# Altium footprint library Brian_.PcbLib: 66 footprints (part 2 of 5)
Each footprint in its own frame and in the unit in brackets; x right, y up, seen from the top. Pads: shape width x height; smd on the part's side, far side on the other; paste and mask are expansions set on the pad; w line width, h text height; cw(c..) or ccw(c..) is an arc to the next point about the centre after c.
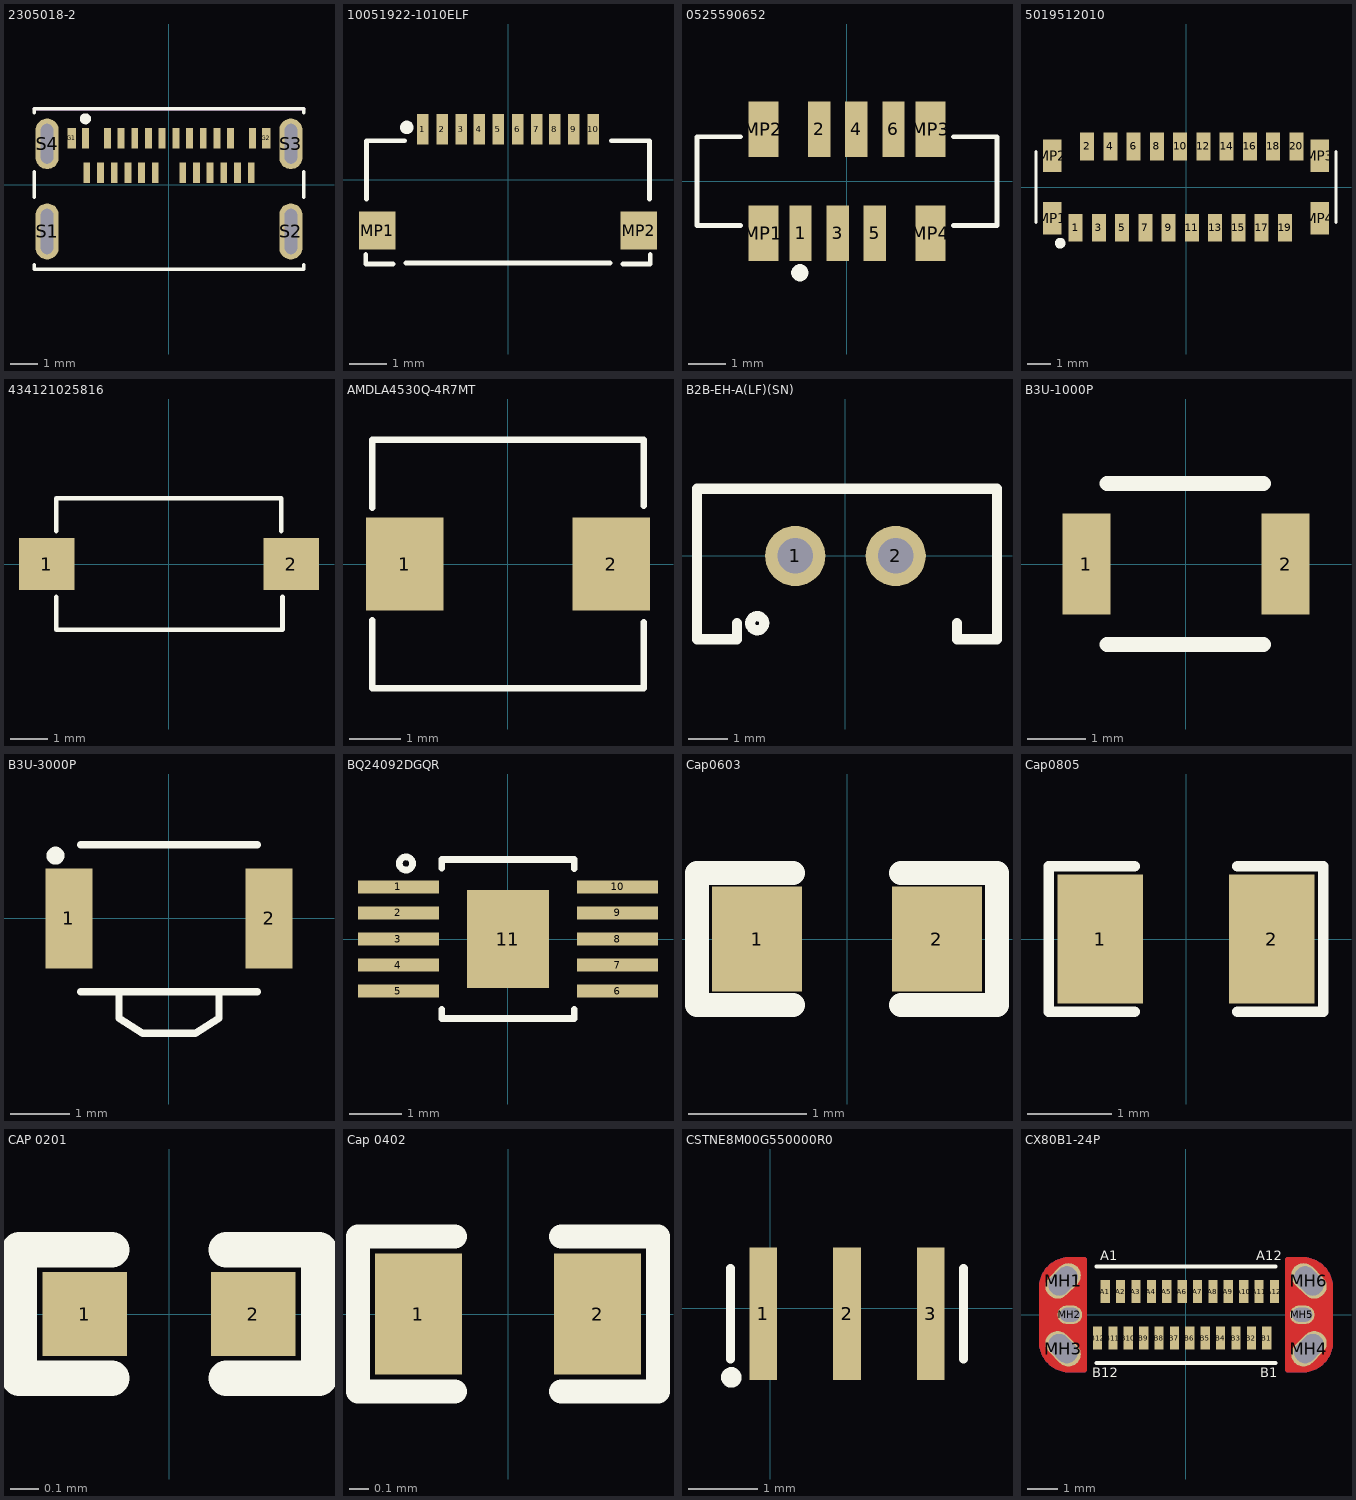
[diagram p1: the footprints below, top view; thin cyan lines are the x and y axes]

## 2305018-2 [mm]
pads (30):
  rect 0.25x0.75 smd: A1(-3.05,1.7) A2(-2.25,1.7) A3(-1.75,1.7) A4(-1.25,1.7) A5(-0.75,1.7) A6(-0.25,1.7) A7(0.25,1.7) A8(0.75,1.7) A9(1.25,1.7) A10(1.75,1.7) A11(2.25,1.7) A12(3.05,1.7) B1(3,0.45) B2(2.5,0.45) B3(2,0.45) B4(1.5,0.45) B5(1,0.45) B6(0.5,0.45) B7(-0.5,0.45) B8(-1,0.45) B9(-1.5,0.45) B10(-2,0.45) B11(-2.5,0.45) B12(-3,0.45)
  rect 0.3x0.75 smd: G1(-3.55,1.7) G2(3.55,1.7)
  oval 0.85x2.05 hole 0.45 slot 1.65 at 90 deg: S1(-4.45,-1.7) S2(4.45,-1.7)
  oval 0.85x1.85 hole 0.45 slot 1.45 at 90 deg: S3(4.45,1.5) S4(-4.45,1.5)
Top Overlay:
  circle w0.2: c-3.05,2.413 r0.1
  lines w0.127: -4.925,-2.906 -4.925,-3.075 4.925,-3.075 4.925,-2.906 ; -4.925,-0.444 -4.925,0.48 ; -4.925,2.634 -4.925,2.775 4.925,2.775 4.925,2.634 ; 4.925,-0.444 4.925,0.48
Mechanical 13:
  lines w0.127: -4.925,2.775 4.925,2.775
3D body "2305018-2--3DModel-STEP-56544.STEP": height 3.53, standoff -0.53, extent -4.919,-5.856 4.919,2.794

## 10051922-1010ELF [mil]
pads (12):
  rect 12x32 smd: 1(-89,53) 2(-69,53) 3(-49,53) 4(-30,53) 5(-10,53) 6(10,53) 7(30,53) 8(49,53) 9(69,53) 10(89,53)
  rect 38x40 smd: MP1(-137,-53) MP2(137,-53)
Top Overlay:
  circle w10: c-106,55 r2
  lines w5: -149,-78 -149,-88 -120,-88 ; -148,-20 -148,41 -108,41 ; -107,-87 107,-87 ; 108,41 148,41 148,-20 ; 120,-88 149,-88 149,-78
3D body "s10051922_1010elf.stp": height 50, standoff -1.18, extent -147.64,-86 147.64,61.64

## 0525590652 [mm]
pads (10):
  rect 0.6x1.5 smd: 1(-1.25,-1.4) 2(-0.75,1.4) 3(-0.25,-1.4) 4(0.25,1.4) 5(0.75,-1.4) 6(1.25,1.4)
  rect 0.8x1.5 smd: MP1(-2.25,-1.4) MP2(-2.25,1.4) MP3(2.25,1.4) MP4(2.25,-1.4)
Top Overlay:
  circle w0.254: c-1.27,-2.464 r0.105
  lines w0.127: -2.87,-1.194 -4.039,-1.194 -4.039,1.194 -2.87,1.194 ; 2.87,-1.194 4.039,-1.194 4.039,1.194 2.87,1.194
3D body "525590652.stp": height 3.9, standoff 0, extent -4.35,-1.65 4.35,1.85

## 5019512010 [mm]
pads (24):
  rect 0.6x1.2 smd: 1(-4.75,-1.75) 2(-4.25,1.75) 3(-3.75,-1.75) 4(-3.25,1.75) 5(-2.75,-1.75) 6(-2.25,1.75) 7(-1.75,-1.75) 8(-1.25,1.75) 9(-0.75,-1.75) 10(-0.25,1.75) 11(0.25,-1.75) 12(0.75,1.75) 13(1.25,-1.75) 14(1.75,1.75) 15(2.25,-1.75) 16(2.75,1.75) 17(3.25,-1.75) 18(3.75,1.75) 19(4.25,-1.75) 20(4.75,1.75)
  rect 0.8x1.4 smd: MP1(-5.75,-1.35) MP2(-5.75,1.35) MP3(5.75,1.35) MP4(5.75,-1.35)
Top Overlay:
  circle w0.254: c-5.41,-2.413 r0.102
  lines w0.127: -6.452,-1.524 -6.452,1.524 ; 6.452,-1.524 6.452,1.524
3D body "5019512010.stp": height 4.56, standoff -0.04, extent -6.4,-2.132 6.4,2.002

## 434121025816 [mm] "SWITCH TACTILE SPST-NO 0.05A 12V"
pads (2):
  rect 1.5x1.4 smd: 1(-3.3,0) 2(3.3,0)
Top Overlay:
  lines w0.127: -3.048,-0.889 -3.048,-1.778 3.066,-1.778 3.066,-0.889 ; -3.048,0.889 -3.048,1.778 3.033,1.778 3.033,0.889
3D body "434121025816_Download_STP_434121025816_rev1.stp": height 2.5, standoff 0, extent -3.65,-1.95 3.65,1.95

## AMDLA4530Q-4R7MT [mm]
pads (2):
  rect 1.5x1.8 smd: 1(-2,0) 2(2,0)
Top Overlay:
  lines w0.127: -2.628,-1.092 -2.628,-1.512 -2.628,-2.401 0,-2.401 2.628,-2.401 ; -2.628,1.092 -2.628,1.512 -2.628,2.401 0,2.401 2.628,2.401 ; 2.628,-2.35 2.628,-1.512 2.628,-1.131 ; 2.628,1.131 2.628,1.512 2.628,2.35
3D body "amdla4530q-4r7mt.stp": height 2.92, standoff 0.02, extent -2.55,-2.35 2.55,2.35

## B2B-EH-A(LF)(SN) [mil]
pads (2):
  round 60 hole 35.43: 1(-50,0) 2(50,0)
Top Overlay:
  circle w10: c-88,-67 r7.07
  lines w10: -108,-67 -108,-83 -148,-83 -148,67 151,67 151,-83 111,-83 111,-67
3D body "User Library-B2B-EH-A.step": height 244.09, standoff -118.11, extent -147.64,-85.61 147.64,64

## B3U-1000P [mm] "SWITCH TACTILE SPST-NO 0.05A 12V"
pads (2):
  rect 0.82x1.72 smd: 1(-1.7,0) 2(1.7,0)
Top Overlay:
  lines w0.254: -1.346,-1.372 0,-1.372 1.321,-1.372 ; -1.346,1.372 0,1.372 1.321,1.372
3D body "User Library-OMRON B3U1000P.step": height 1.6, standoff 0, extent -2,-1.263 2,1.237

## B3U-3000P [mm]
pads (2):
  rect 0.8x1.7 smd mask+0.06: 1(-1.7,0) 2(1.7,0)
Top Overlay:
  circle w0.254: c-1.93,1.067 r0.025
  lines w0.127: -1.5,-1.25 -0.85,-1.25 ; -1.5,1.25 1.5,1.25 ; 1.5,-1.25 0.85,-1.25 ; -0.85,-1.25 0.85,-1.25 ; -0.85,-1.25 -0.85,-1.7 -0.45,-1.95 0.45,-1.95 0.85,-1.7 0.85,-1.25
3D body "B3U-3000P--3DModel-STEP-56544.STEP": height 1.2, standoff 0, extent -2,-1.95 2,1.25

## BQ24092DGQR [mm] "IC BATT CHG LI-ION 1CELL 10MSOP"
pads (11):
  rect 1.55x0.25 smd: 1(-2.1,1) 2(-2.1,0.5) 3(-2.1,0) 4(-2.1,-0.5) 5(-2.1,-1) 6(2.1,-1) 7(2.1,-0.5) 8(2.1,0) 9(2.1,0.5) 10(2.1,1)
  rect 1.57x1.88 smd: 11(0,0)
Top Overlay:
  circle w0.127: c-1.956,1.448 r0.127
  lines w0.127: -1.27,-1.348 -1.27,-1.524 1.27,-1.524 1.27,-1.349 ; -1.27,1.355 -1.27,1.524 1.27,1.524 1.27,1.35
3D body "BQ24092DGQR.STEP": height 1.1, standoff 0, extent -2.45,-1.5 2.45,1.5

## Cap0603 [mil]
pads (2):
  rect 30x35 smd mask+2.36: 1(-30,0) 2(30,0)
Top Overlay:
  lines w7.87: -18,-22 -50,-22 -50,22 -18,22 ; 18,-22 50,-22 50,22 18,22
3D body "User Library-CAPC1608X09.step": height 34.25, standoff -1.18, extent -31.51,-15.75 31.49,15.74

## Cap0805 [mil] "SMD 0805"
pads (2):
  rect 40x60 smd mask+2.76: 1(-40,0) 2(40,0)
Top Overlay:
  lines w5: -24,-34 -64,-34 -64,34 -24,34 ; 24,-34 64,-34 64,34 24,34
3D body "User Library-0805 SMD Capacitor.step": height 30, standoff -0.79, extent -39.36,-24.6 39.38,24.61

## CAP 0201 [mm]
pads (2):
  rect 0.3x0.3 smd mask+0.055: 1(-0.3,0) 2(0.3,0)
Top Overlay:
  lines w0.127: -0.203,-0.229 -0.533,-0.229 -0.533,0.229 -0.203,0.229 ; 0.203,-0.229 0.533,-0.229 0.533,0.229 0.203,0.229
3D body "User Library-SMD Ceramic Capacitors_0201 (0603)_AB.STEP": height 0.28, standoff -0.02, extent -0.3,-0.15 0.301,0.15

## Cap 0402 [mil]
pads (2):
  rect 18x25 smd mask+2.36: 1(-18.5,0) 2(18.5,0)
Top Overlay:
  lines w5: -11,-16 -31,-16 -31,16 -11,16 ; 11,-16 31,-16 31,16 11,16
3D body "User Library-Capacitor 0402.step": height 18.5, standoff -1.18, extent -19.68,-9.84 19.7,9.85

## CSTNE8M00G550000R0 [mm]
pads (3):
  rect 0.4x1.9 smd: 1(-0.102,-0.076) 2(1.098,-0.076) 3(2.298,-0.076)
Top Overlay:
  circle w0.2: c-0.559,-0.991 r0.047
  lines w0.127: -0.571,-0.726 -0.571,0.574 ; 2.768,-0.726 2.768,0.574
3D body "step_temp.STEP": height 0.8, standoff 0, extent -0.501,-0.726 2.698,0.574

## CX80B1-24P [mm]
pads (30):
  rect 0.3x0.75 smd: A1(-2.625,0.755) A2(-2.125,0.755) A3(-1.625,0.755) A4(-1.125,0.755) A5(-0.625,0.755) A6(-0.125,0.755) A7(0.375,0.755) A8(0.875,0.755) A9(1.375,0.755) A10(1.875,0.755) A11(2.375,0.755) A12(2.875,0.755) B1(2.625,-0.755) B2(2.125,-0.755) B3(1.625,-0.755) B4(1.125,-0.755) B5(0.625,-0.755) B6(0.125,-0.755) B7(-0.375,-0.755) B8(-0.875,-0.755) B9(-1.375,-0.755) B10(-1.875,-0.755) B11(-2.375,-0.755) B12(-2.875,-0.755)
  oval 1.3x0.8 hole 0.7 slot 1.05 at 45 deg rot 45: MH1(-3.995,1.1) MH4(3.995,-1.1)
  oval 0.8x0.6 hole 0.45 slot 0.65 at 0 deg: MH2(-3.775,0) MH5(3.775,0)
  oval 1.3x0.8 hole 0.7 slot 1.05 at 135 deg rot 135: MH3(-3.995,-1.1) MH6(3.995,1.1)
Top Layer:
  region: 3.827,1.874 3.88,1.87 3.931,1.863 3.983,1.853 4.034,1.841 4.084,1.826 4.133,1.809 4.182,1.789 4.229,1.766 4.275,1.741 4.32,1.714 4.363,1.684 4.404,1.652 4.444,1.618 4.482,1.582 4.518,1.544 4.552,1.504 4.584,1.463 4.614,1.42 4.641,1.375 4.666,1.329 4.689,1.282 4.709,1.233 4.726,1.184 4.741,1.134 4.753,1.083 4.763,1.031 4.77,0.98 4.774,0.927 4.775,0.875 4.775,-0.875 4.774,-0.927 4.77,-0.98 4.763,-1.031 4.753,-1.083 4.741,-1.134 4.726,-1.184 4.709,-1.233 4.689,-1.282 4.666,-1.329 4.641,-1.375 4.614,-1.42 4.584,-1.463 4.552,-1.504 4.518,-1.544 4.482,-1.582 4.444,-1.618 4.404,-1.652 4.363,-1.684 4.32,-1.714 4.275,-1.741 4.229,-1.766 4.182,-1.789 4.133,-1.809 4.084,-1.826 4.034,-1.841 3.983,-1.853 3.931,-1.863 3.88,-1.87 3.827,-1.874 3.775,-1.875 3.325,-1.875 3.32,-1.875 3.315,-1.874 3.309,-1.874 3.304,-1.873 3.299,-1.872 3.294,-1.87 3.289,-1.868 3.284,-1.866 3.28,-1.864 3.275,-1.862 3.271,-1.859 3.266,-1.856 3.262,-1.853 3.258,-1.849 3.254,-1.846 3.251,-1.842 3.247,-1.838 3.244,-1.834 3.241,-1.829 3.238,-1.825 3.236,-1.82 3.234,-1.816 3.232,-1.811 3.23,-1.806 3.228,-1.801 3.227,-1.796 3.226,-1.791 3.226,-1.785 3.225,-1.78 3.225,-1.775 3.225,1.775 3.225,1.78 3.226,1.785 3.226,1.791 3.227,1.796 3.228,1.801 3.23,1.806 3.232,1.811 3.234,1.816 3.236,1.82 3.238,1.825 3.241,1.829 3.244,1.834 3.247,1.838 3.251,1.842 3.254,1.846 3.258,1.849 3.262,1.853 3.266,1.856 3.271,1.859 3.275,1.862 3.28,1.864 3.284,1.866 3.289,1.868 3.294,1.87 3.299,1.872 3.304,1.873 3.309,1.874 3.315,1.874 3.32,1.875 3.325,1.875 3.775,1.875
  region: -3.32,1.875 -3.315,1.874 -3.309,1.874 -3.304,1.873 -3.299,1.872 -3.294,1.87 -3.289,1.868 -3.284,1.866 -3.28,1.864 -3.275,1.862 -3.271,1.859 -3.266,1.856 -3.262,1.853 -3.258,1.849 -3.254,1.846 -3.251,1.842 -3.247,1.838 -3.244,1.834 -3.241,1.829 -3.238,1.825 -3.236,1.82 -3.234,1.816 -3.232,1.811 -3.23,1.806 -3.228,1.801 -3.227,1.796 -3.226,1.791 -3.226,1.785 -3.225,1.78 -3.225,1.775 -3.225,-1.775 -3.225,-1.78 -3.226,-1.785 -3.226,-1.791 -3.227,-1.796 -3.228,-1.801 -3.23,-1.806 -3.232,-1.811 -3.234,-1.816 -3.236,-1.82 -3.238,-1.825 -3.241,-1.829 -3.244,-1.834 -3.247,-1.838 -3.251,-1.842 -3.254,-1.846 -3.258,-1.849 -3.262,-1.853 -3.266,-1.856 -3.271,-1.859 -3.275,-1.862 -3.28,-1.864 -3.284,-1.866 -3.289,-1.868 -3.294,-1.87 -3.299,-1.872 -3.304,-1.873 -3.309,-1.874 -3.315,-1.874 -3.32,-1.875 -3.325,-1.875 -3.775,-1.875 -3.827,-1.874 -3.88,-1.87 -3.931,-1.863 -3.983,-1.853 -4.034,-1.841 -4.084,-1.826 -4.133,-1.809 -4.182,-1.789 -4.229,-1.766 -4.275,-1.741 -4.32,-1.714 -4.363,-1.684 -4.404,-1.652 -4.444,-1.618 -4.482,-1.582 -4.518,-1.544 -4.552,-1.504 -4.584,-1.463 -4.614,-1.42 -4.641,-1.375 -4.666,-1.329 -4.689,-1.282 -4.709,-1.233 -4.726,-1.184 -4.741,-1.134 -4.753,-1.083 -4.763,-1.031 -4.77,-0.98 -4.774,-0.927 -4.775,-0.875 -4.775,0.875 -4.774,0.927 -4.77,0.98 -4.763,1.031 -4.753,1.083 -4.741,1.134 -4.726,1.184 -4.709,1.233 -4.689,1.282 -4.666,1.329 -4.641,1.375 -4.614,1.42 -4.584,1.463 -4.552,1.504 -4.518,1.544 -4.482,1.582 -4.444,1.618 -4.404,1.652 -4.363,1.684 -4.32,1.714 -4.275,1.741 -4.229,1.766 -4.182,1.789 -4.133,1.809 -4.084,1.826 -4.034,1.841 -3.983,1.853 -3.931,1.863 -3.88,1.87 -3.827,1.874 -3.775,1.875 -3.325,1.875
Bottom Layer:
  region: -3.32,1.875 -3.315,1.874 -3.309,1.874 -3.304,1.873 -3.299,1.872 -3.294,1.87 -3.289,1.868 -3.284,1.866 -3.28,1.864 -3.275,1.862 -3.271,1.859 -3.266,1.856 -3.262,1.853 -3.258,1.849 -3.254,1.846 -3.251,1.842 -3.247,1.838 -3.244,1.834 -3.241,1.829 -3.238,1.825 -3.236,1.82 -3.234,1.816 -3.232,1.811 -3.23,1.806 -3.228,1.801 -3.227,1.796 -3.226,1.791 -3.226,1.785 -3.225,1.78 -3.225,1.775 -3.225,-1.775 -3.225,-1.78 -3.226,-1.785 -3.226,-1.791 -3.227,-1.796 -3.228,-1.801 -3.23,-1.806 -3.232,-1.811 -3.234,-1.816 -3.236,-1.82 -3.238,-1.825 -3.241,-1.829 -3.244,-1.834 -3.247,-1.838 -3.251,-1.842 -3.254,-1.846 -3.258,-1.849 -3.262,-1.853 -3.266,-1.856 -3.271,-1.859 -3.275,-1.862 -3.28,-1.864 -3.284,-1.866 -3.289,-1.868 -3.294,-1.87 -3.299,-1.872 -3.304,-1.873 -3.309,-1.874 -3.315,-1.874 -3.32,-1.875 -3.325,-1.875 -3.775,-1.875 -3.827,-1.874 -3.88,-1.87 -3.931,-1.863 -3.983,-1.853 -4.034,-1.841 -4.084,-1.826 -4.133,-1.809 -4.182,-1.789 -4.229,-1.766 -4.275,-1.741 -4.32,-1.714 -4.363,-1.684 -4.404,-1.652 -4.444,-1.618 -4.482,-1.582 -4.518,-1.544 -4.552,-1.504 -4.584,-1.463 -4.614,-1.42 -4.641,-1.375 -4.666,-1.329 -4.689,-1.282 -4.709,-1.233 -4.726,-1.184 -4.741,-1.134 -4.753,-1.083 -4.763,-1.031 -4.77,-0.98 -4.774,-0.927 -4.775,-0.875 -4.775,0.875 -4.774,0.927 -4.77,0.98 -4.763,1.031 -4.753,1.083 -4.741,1.134 -4.726,1.184 -4.709,1.233 -4.689,1.282 -4.666,1.329 -4.641,1.375 -4.614,1.42 -4.584,1.463 -4.552,1.504 -4.518,1.544 -4.482,1.582 -4.444,1.618 -4.404,1.652 -4.363,1.684 -4.32,1.714 -4.275,1.741 -4.229,1.766 -4.182,1.789 -4.133,1.809 -4.084,1.826 -4.034,1.841 -3.983,1.853 -3.931,1.863 -3.88,1.87 -3.827,1.874 -3.775,1.875 -3.325,1.875
  region: 3.827,1.874 3.88,1.87 3.931,1.863 3.983,1.853 4.034,1.841 4.084,1.826 4.133,1.809 4.182,1.789 4.229,1.766 4.275,1.741 4.32,1.714 4.363,1.684 4.404,1.652 4.444,1.618 4.482,1.582 4.518,1.544 4.552,1.504 4.584,1.463 4.614,1.42 4.641,1.375 4.666,1.329 4.689,1.282 4.709,1.233 4.726,1.184 4.741,1.134 4.753,1.083 4.763,1.031 4.77,0.98 4.774,0.927 4.775,0.875 4.775,-0.875 4.774,-0.927 4.77,-0.98 4.763,-1.031 4.753,-1.083 4.741,-1.134 4.726,-1.184 4.709,-1.233 4.689,-1.282 4.666,-1.329 4.641,-1.375 4.614,-1.42 4.584,-1.463 4.552,-1.504 4.518,-1.544 4.482,-1.582 4.444,-1.618 4.404,-1.652 4.363,-1.684 4.32,-1.714 4.275,-1.741 4.229,-1.766 4.182,-1.789 4.133,-1.809 4.084,-1.826 4.034,-1.841 3.983,-1.853 3.931,-1.863 3.88,-1.87 3.827,-1.874 3.775,-1.875 3.325,-1.875 3.32,-1.875 3.315,-1.874 3.309,-1.874 3.304,-1.873 3.299,-1.872 3.294,-1.87 3.289,-1.868 3.284,-1.866 3.28,-1.864 3.275,-1.862 3.271,-1.859 3.266,-1.856 3.262,-1.853 3.258,-1.849 3.254,-1.846 3.251,-1.842 3.247,-1.838 3.244,-1.834 3.241,-1.829 3.238,-1.825 3.236,-1.82 3.234,-1.816 3.232,-1.811 3.23,-1.806 3.228,-1.801 3.227,-1.796 3.226,-1.791 3.226,-1.785 3.225,-1.78 3.225,-1.775 3.225,1.775 3.225,1.78 3.226,1.785 3.226,1.791 3.227,1.796 3.228,1.801 3.23,1.806 3.232,1.811 3.234,1.816 3.236,1.82 3.238,1.825 3.241,1.829 3.244,1.834 3.247,1.838 3.251,1.842 3.254,1.846 3.258,1.849 3.262,1.853 3.266,1.856 3.271,1.859 3.275,1.862 3.28,1.864 3.284,1.866 3.289,1.868 3.294,1.87 3.299,1.872 3.304,1.873 3.309,1.874 3.315,1.874 3.32,1.875 3.325,1.875 3.775,1.875
Top Overlay:
  lines w0.127: -2.905,-1.57 2.905,-1.57 ; -2.905,1.57 2.905,1.57
  text "A1" at -2.794,1.778 h0.3
  text "A12" at 2.286,1.778 h0.3
  text "B12" at -3.048,-2.032 h0.3
  text "B1" at 2.413,-2.032 h0.3
Top Solder:
  drawing of 2 lines, arcs and shapes, not listed
Bottom Solder:
  drawing of 2 lines, arcs and shapes, not listed
Mechanical 1:
  lines w0: -4.125,-0.05 -4.125,0.05 ; -3.425,-0.05 -3.425,0.05 ; 3.425,-0.05 3.425,0.05 ; 4.125,-0.05 4.125,0.05 ; -4.419,-1.171 cw(c-4.172,-0.923) -4.419,-0.676 cw(c-4.172,-0.923) -3.924,-0.676 -3.571,-1.029 cw(c-3.818,-1.277) -3.571,-1.524 cw(c-3.818,-1.277) -4.066,-1.524 -4.419,-1.171 ; -4.419,0.676 ccw(c-4.172,0.923) -3.924,0.676 -3.571,1.029 ccw(c-3.818,1.277) -3.571,1.524 ccw(c-3.818,1.277) -4.066,1.524 -4.419,1.171 ccw(c-4.172,0.923) -4.419,0.676 ; 3.571,-1.524 ccw(c3.818,-1.277) 4.066,-1.524 4.419,-1.171 ccw(c4.172,-0.923) 4.419,-0.676 ccw(c4.172,-0.923) 3.924,-0.676 3.571,-1.029 ccw(c3.818,-1.277) 3.571,-1.524 ; 3.571,1.029 cw(c3.818,1.277) 3.571,1.524 cw(c3.818,1.277) 4.066,1.524 4.419,1.171 cw(c4.172,0.923) 4.419,0.676 cw(c4.172,0.923) 3.924,0.676 3.571,1.029
3D body "cx80b1-24p_3d_step-N_asm.stp": height 7.19, standoff -0.91, extent -4.744,-2.584 4.796,2.416